# Altium schematic symbol library GRM21BR61E226ME44L.SchLib: 1 symbol
Pins are listed as number, name and electrical type; pins without a type are passive.

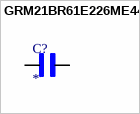
[diagram p0: symbol GRM21BR61E226ME44L]

## GRM21BR61E226ME44L
designator C?
22 ÂµF Â±20% 25V Ceramic Capacitor X5R 0805 (2012 Metric); MF: Murata Electronics; MP: GRM21BR61E226ME44L; SnapEDA_Link: https://www.snapeda.com/parts/GRM21BR61E226ME44L/Murata+Electronics+North+America/view-part/?ref=snap; Package: 2012 Murata; Value: *; Check_prices: https://www.snapeda.com/parts/GRM21BR61E226ME44L/Murata+Electronics+North+America/view-part/?ref=eda
footprint CAPC2012X135N
pins: 1, 2